# Altium integrated library ADS8688IDBTR.IntLib: 1 symbol
Pins are listed as number, name and electrical type; pins without a type are passive.

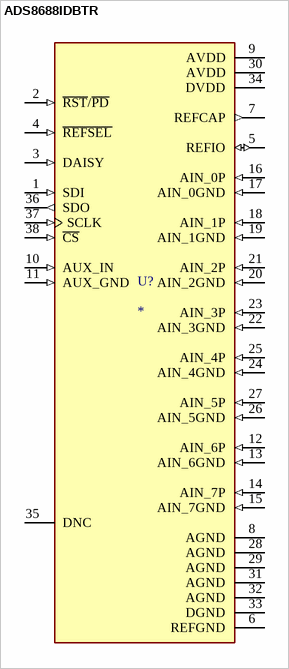
[diagram p0: symbol ADS8688IDBTR]

## ADS8688IDBTR
designator U?
MP: ADS8688IDBTR; Package: None; Price: None; Value: *; Availability: Unavailable
footprint SOP50P640X120-38N
pins: 1 SDI (in), 2 ~{RST}/~{PD} (in), 3 DAISY (in), 4 ~{REFSEL} (in), 5 REFIO (io), 6 REFGND (power), 7 REFCAP (out), 8 AGND (power), 9 AVDD (power), 10 AUX_IN (in), 11 AUX_GND (in), 12 AIN_6P (in), 13 AIN_6GND (in), 14 AIN_7P (in), 15 AIN_7GND (in), 16 AIN_0P (in), 17 AIN_0GND (in), 18 AIN_1P (in), 19 AIN_1GND (in), 20 AIN_2GND (in), 21 AIN_2P (in), 22 AIN_3GND (in), 23 AIN_3P (in), 24 AIN_4GND (in), 25 AIN_4P (in), 26 AIN_5GND (in), 27 AIN_5P (in), 28 AGND (power), 29 AGND (power), 30 AVDD (power), 31 AGND (power), 32 AGND (power), 33 DGND (power), 34 DVDD (power), 35 DNC, 36 SDO (out), 37 SCLK (in), 38 ~{CS} (in)